# Altium footprint library TTL To Keyboard Module V3.PcbLib: 7 footprints
Each footprint in its own frame and in the unit in brackets; x right, y up, seen from the top. Pads: shape width x height; smd on the part's side, far side on the other; paste and mask are expansions set on the pad; w line width, h text height; cw(c..) or ccw(c..) is an arc to the next point about the centre after c.
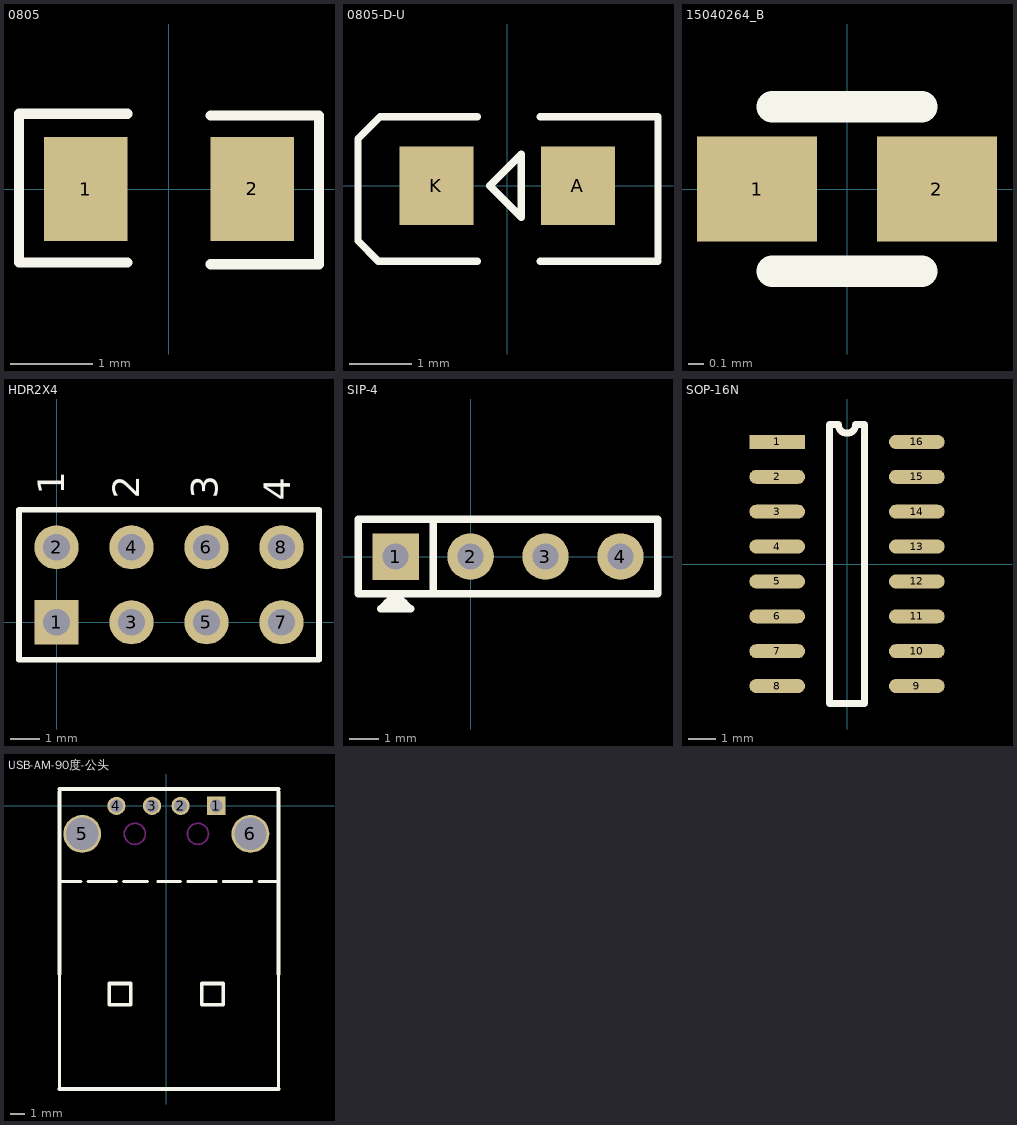
[diagram p0: the footprints below, top view; thin cyan lines are the x and y axes]

## 0805 [mil]
height 80
pads (2):
  rect 40x50 smd: 1(-40,0) 2(40,0)
Top Overlay:
  lines w5: -20,-35.23 -71.93,-35.23 -71.93,36.02 -20,36.02 ; 20,-36.02 71.93,-36.02 71.93,35.23 20,35.23
3D body: height 31.5, standoff 0, extent -50,-29 50,29

## 0805-D-U [mm]
height 0.55
pads (2):
  rect 1.2x1.27 smd: A(1.144,0) K(-1.144,0)
Top Overlay:
  lines w0.12: -0.483,-1.219 -1.753,-1.219 -2.083,-1.219 -2.413,-0.889 -2.413,0.762 -2.057,1.118 -1.88,1.118 -0.483,1.118 ; 0.533,-1.219 2.438,-1.219 ; 0.533,1.118 2.438,1.118 2.438,-1.168 ; -0.279,0 0.229,-0.508 0.229,0.508 -0.279,0
3D body: height 1, standoff 0, extent -1.321,-0.737 1.219,0.737

## 15040264_B [mm]
pads (2):
  rect 0.8x0.7 smd: 1(-0.6,0) 2(0.6,0)
Top Overlay:
  lines w0.21: -0.5,-0.55 0.5,-0.55 ; -0.5,0.55 0.5,0.55

## HDR2X4 [mm] "Connector; Header; 4x2 Position"
pads (8):
  rect 1.5x1.5 hole 0.9: 1(0,0)
  round 1.5 hole 0.9: 2(0,2.54) 3(2.54,0) 4(2.54,2.54) 5(5.08,0) 6(5.08,2.54) 7(7.62,0) 8(7.62,2.54)
Top Overlay:
  lines w0.2: -1.27,-1.27 -1.27,3.81 8.89,3.81 8.89,-1.27 -1.27,-1.27
  text "3" at 5.461,4.191 h0.9
  text "4" at 7.925,4.115 h0.9
  text "1" at 0.254,4.318 h0.9
  text "2" at 2.794,4.191 h0.9

## SIP-4 [mil]
height 437.01
pads (4):
  rect 62x62 hole 35: 1(-100,0)
  round 62 hole 35: 2(0,0) 3(100,0) 4(200,0)
Top Overlay:
  lines w10: -111.56,-61.56 -88.38,-61.62 ; -50,-50 -50,50 ; -150,-50 250,-50 250,50 -150,50 -150,-50 ; -120,-70 -90,-70 -80,-70 -100,-50 -120,-70

## SOP-16N [mil]
height 21.65
pads (16):
  rect 80x20 smd: 1(-100,175)
  oval 80x20 smd: 2(-100,125) 3(-100,75) 4(-100,25) 5(-100,-25) 6(-100,-75) 7(-100,-125) 8(-100,-175) 9(100,-175) 10(100,-125) 11(100,-75) 12(100,-25) 13(100,25) 14(100,75) 15(100,125) 16(100,175)
Top Overlay:
  lines w10: -25,-200 -25,200 -12.5,200 ccw(c0,200) 12.5,200 25,200 25,-200 -25,-200
3D body "SOIC16.STEP": height 57, standoff 0, extent -117.49,-196.5 115,196.5

## USB-AM-90度-公头 [mm]
pads (6):
  rect 1.3x1.3 hole 0.92: 1(3.56,0)
  round 1.3 hole 0.92: 2(1.02,0) 3(-1.02,0) 4(-3.56,0)
  round 2.7 hole 2.3: 5(-6,-2) 6(6,-2)
Top Overlay:
  lines w0.2: -7.62,-20.2 -7.62,-12 ; -7.62,-5.4 -6.096,-5.4 ; -5.588,-5.4 -5.08,-5.4 -3.556,-5.4 ; -3.048,-5.4 -1.336,-5.4 ; -0.618,-5.4 1.016,-5.4 ; 1.524,-5.4 2.54,-5.4 3.556,-5.4 ; 4.064,-5.4 6.096,-5.4 ; 6.604,-5.4 8,-5.4 ; 8,-20.2 8,-12
  lines w0.254: -7.62,-20.2 8,-20.2 ; -7.62,-12 -7.62,0 -7.62,1.016 ; -7.62,1.2 8,1.2 ; 8,-12 8,0 8,1.016 ; -4.064,-14.2 -2.54,-14.2 -2.54,-12.676 -4.064,-12.676 -4.064,-14.2 ; 2.54,-14.2 4.064,-14.2 4.064,-12.676 2.54,-12.676 2.54,-14.2
Keep-Out Layer:
  circle w0.127: c-2.25,-2 r0.75
  circle w0.127: c2.25,-2 r0.75